# EAGLE library part ST_CART (library ce_cart)
Atari ST cartridge port (ROM port) - card edge
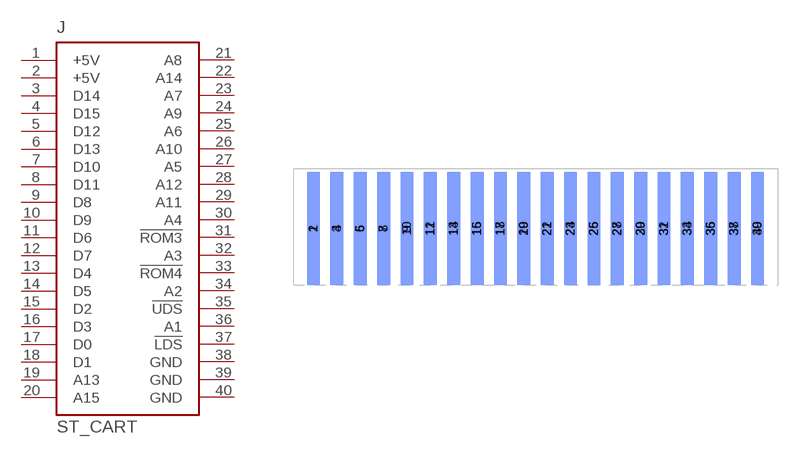
[diagram p0: symbol with the pads of ST_CART_EDGE_2X20; footprint ST_CART_EDGE_2X20]

Designator prefix J

## ST_CART  [ST_CART_EDGE_2X20]
1  +5V
2  +5V
3  D14
4  D15
5  D12
6  D13
7  D10
8  D11
9  D8
10  D9
11  D6
12  D7
13  D4
14  D5
15  D2
16  D3
17  D0
18  D1
19  A13
20  A15
21  A8
22  A14
23  A7
24  A9
25  A6
26  A10
27  A5
28  A12
29  A11
30  A4
31  !ROM3
32  A3
33  !ROM4
34  A2
35  !UDS
36  A1
37  !LDS
38  GND
39  GND
40  GND

## Footprint ST_CART_EDGE_2X20 (pad centres in mm)
Atari ST cartridge port card edge. Board edge (tongue tip) at y=0, tongue goes to y=-10. Tongue 41.5 x 10 mm, pads 1.1 mm wide at 2 mm pitch (0.9 mm gap), first/last pad 1.2 mm from the side. Solder mask open over the whole tongue on both sides. Draw the tongue in the board outline (Dimension) along the tDocu lines.
smd 1.1 x 9.7: 1 -19,-5.15; 3 -17,-5.15; 5 -15,-5.15; 7 -13,-5.15; 9 -11,-5.15; 11 -9,-5.15; 13 -7,-5.15; 15 -5,-5.15; 17 -3,-5.15; 19 -1,-5.15; 21 1,-5.15; 23 3,-5.15; 25 5,-5.15; 27 7,-5.15; 29 9,-5.15; 31 11,-5.15; 33 13,-5.15; 35 15,-5.15; 37 17,-5.15; 39 19,-5.15
smd 1.1 x 9.7 bottom: 2 -19,-5.15; 4 -17,-5.15; 6 -15,-5.15; 8 -13,-5.15; 10 -11,-5.15; 12 -9,-5.15; 14 -7,-5.15; 16 -5,-5.15; 18 -3,-5.15; 20 -1,-5.15; 22 1,-5.15; 24 3,-5.15; 26 5,-5.15; 28 7,-5.15; 30 9,-5.15; 32 11,-5.15; 34 13,-5.15; 36 15,-5.15; 38 17,-5.15; 40 19,-5.15